# EAGLE library part IC_MCP4132 (library dp_devices.v6)
7/8 Bit SPI Digital rheostat with volatile memory
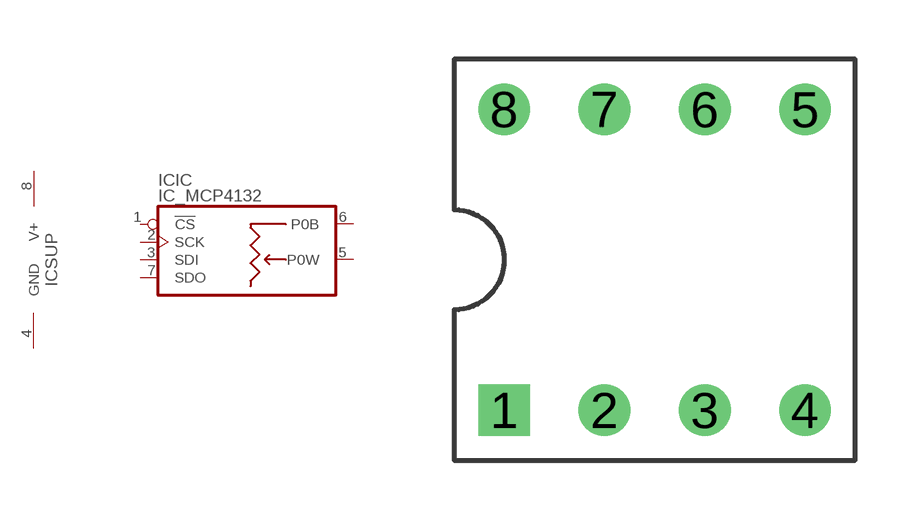
[diagram p192: symbol with the pads of DIP8; footprint DIP8]

Designator prefix IC; gates SUP=SUPPLY IC=MCP4132

## IC_MCP4132  [DIP8]
1  IC:!CS  in
2  IC:SCK  in
3  IC:SDI  in
4  SUP:GND  sup
5  IC:P0W  pas
6  IC:P0B  pas
7  IC:SDO  out
8  SUP:V+  sup

## Footprint DIP8 (pad centres in mm)
drill 0.8 square: 1 -3.81,-3.81
drill 0.8: 2 -1.27,-3.81; 3 1.27,-3.81; 4 3.81,-3.81; 5 3.81,3.81; 6 1.27,3.81; 7 -1.27,3.81; 8 -3.81,3.81